# Altium footprint library Connector_SMD.PcbLib: 116 footprints (part 3 of 8)
Each footprint in its own frame and in the unit in brackets; x right, y up, seen from the top. Pads: shape width x height; smd on the part's side, far side on the other; paste and mask are expansions set on the pad; w line width, h text height; cw(c..) or ccw(c..) is an arc to the next point about the centre after c.
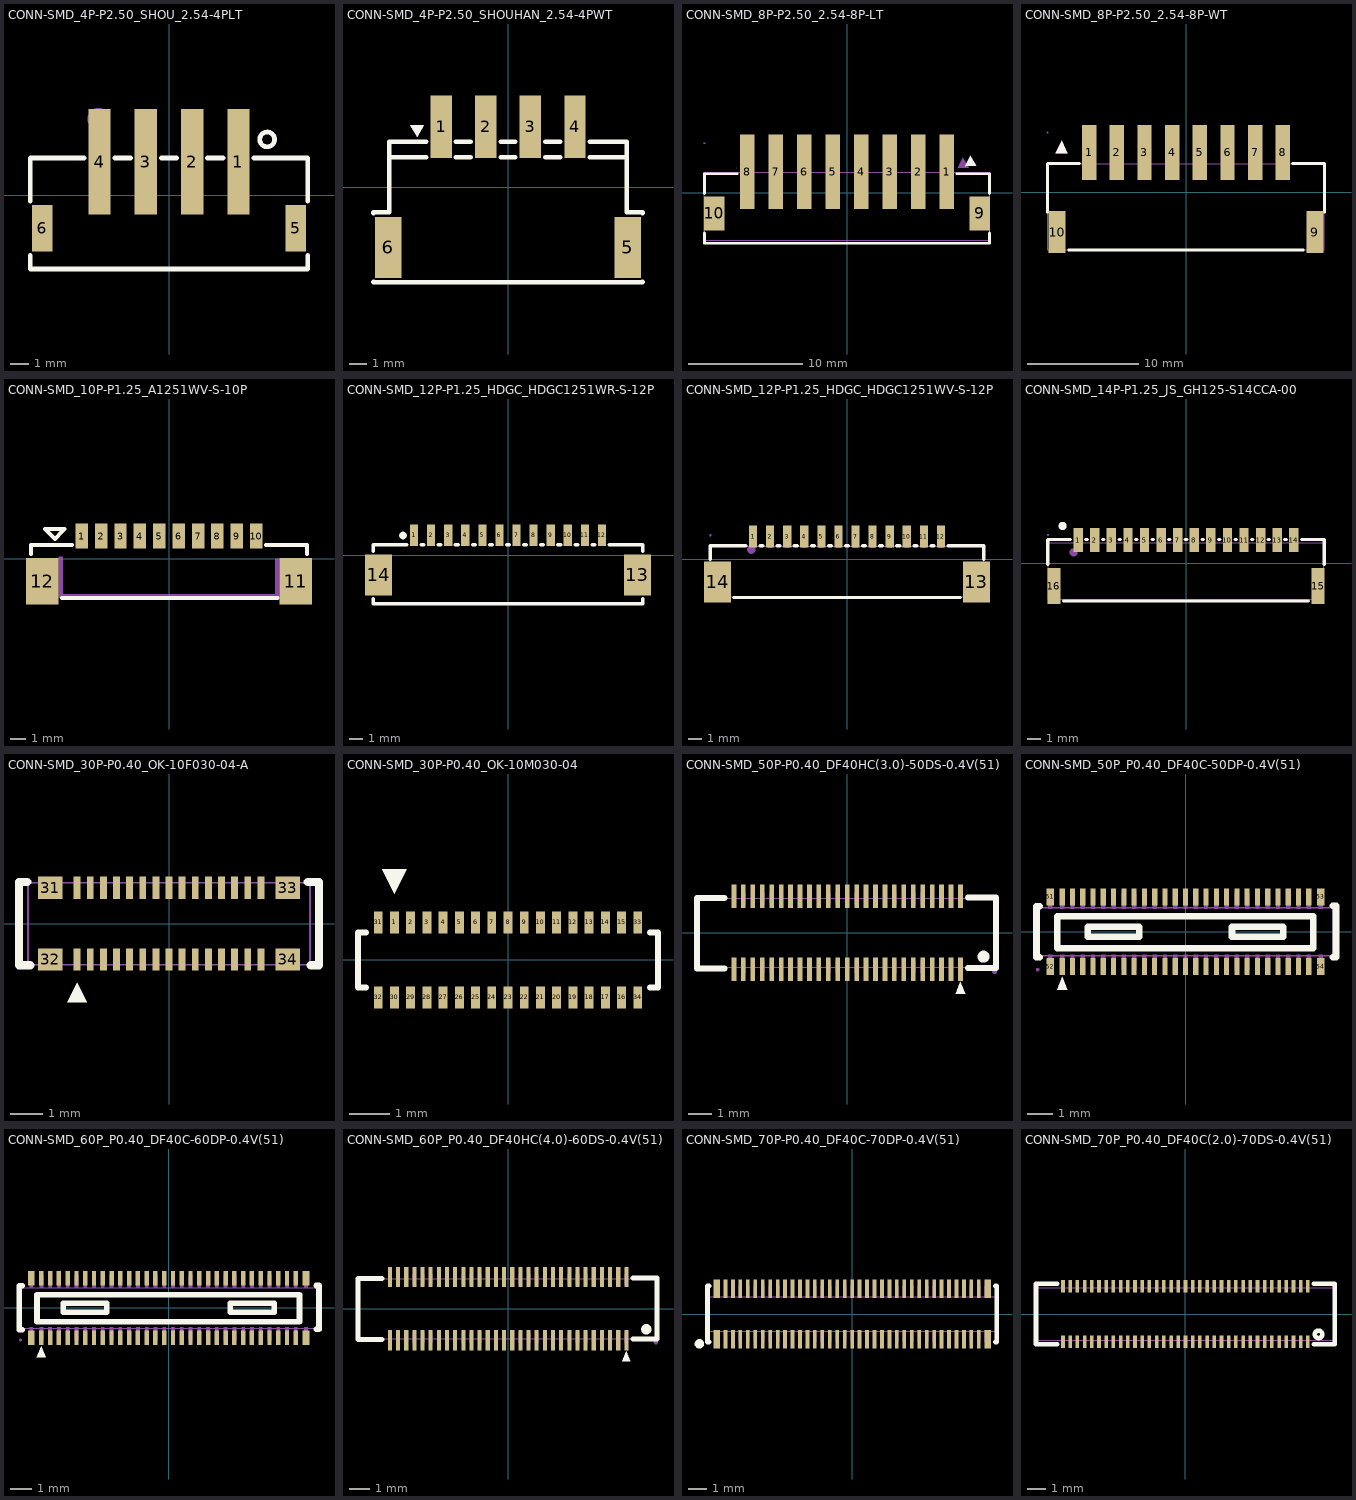
[diagram p2: the footprints below, top view; thin cyan lines are the x and y axes]

## CONN-SMD_4P-P2.50_SHOU_2.54-4PLT [mm]
pads (6):
  rect 1.2x5.7 smd: 1(3.75,1.8) 2(1.25,1.8) 3(-1.25,1.8) 4(-3.75,1.8)
  rect 1.1x2.5 smd: 5(6.85,-1.8) 6(-6.85,-1.8)
Top Overlay:
  circle w0.254: c5.3,3 r0.4
  lines w0.254: -7.5,-3.258 -7.5,-4 7.5,-4 7.5,-3.258 ; -7.5,-0.342 -7.5,2 -4.581,2 ; -2.919,2 -2.081,2 ; -0.419,2 0.419,2 ; 2.081,2 2.919,2 ; 4.581,2 7.5,2 7.5,-0.342
Mechanical 15:
  circle w0.6: c-3.8,4.1 r0.3
3D body "U1.stp": height 7.95, standoff 0, extent -7.5,-3.825 7.5,4.475

## CONN-SMD_4P-P2.50_SHOUHAN_2.54-4PWT [mm] "CONN-SMD_4P-P2.50_SHOUHAN_2.54-4PWT"
pads (6):
  rect 1.2x3.5 smd: 1(-3.75,3.375) 2(-1.25,3.375) 3(1.25,3.375) 4(3.75,3.375)
  rect 1.5x3.4 smd: 5(6.7,-3.375) 6(-6.7,-3.375)
Top Overlay:
  region: -5.092,2.828 -4.711,3.463 -5.473,3.463
  region: -5.092,2.828 -4.711,3.463 -5.473,3.463
  lines w0.254: -7.533,-5.291 -7.533,-5.334 7.533,-5.334 7.533,-5.29 ; -7.533,-1.459 -7.533,-1.397 -6.644,-1.397 -6.644,2.54 -4.581,2.54 ; -6.644,1.669 -4.581,1.669 ; -2.919,1.669 -2.081,1.669 ; -2.919,2.54 -2.081,2.54 ; -0.419,1.669 0.419,1.669 ; -0.419,2.54 0.419,2.54 ; 2.081,1.669 2.919,1.669 ; 2.081,2.54 2.919,2.54 ; 4.581,1.669 6.644,1.669 ; 4.581,2.54 6.644,2.54 6.644,-1.397 7.533,-1.397 7.533,-1.459
Mechanical 15:
  region: -5.092,2.828 -4.711,3.463 -5.473,3.463
3D body "COMM-SMD_4P-P2.50_SHOUHAN_2.54-4PWT.stp": height 6.1, standoff 0, extent -7.5,-5.262 7.5,4.938

## CONN-SMD_8P-P2.50_2.54-8P-LT [mm]
pads (10):
  rect 1.3x6.5 smd paste+0 mask+0.05: 1(8.75,1.825) 2(6.25,1.825) 3(3.75,1.825) 4(1.25,1.825) 5(-1.25,1.825) 6(-3.75,1.825) 7(-6.25,1.825) 8(-8.75,1.825)
  rect 1.8x3 smd paste+0 mask+0.05: 9(11.65,-1.825) 10(-11.65,-1.825)
Top Overlay:
  region: 10.347,2.286 10.371,2.333
  region: 10.371,2.333 11.33,2.333 10.822,3.222
  lines w0.254: -12.506,-3.556 -12.506,-4.445 12.506,-4.445 12.506,-3.556 ; -12.506,-0.094 -12.506,1.651 -9.631,1.651 ; 9.631,1.651 12.506,1.651 12.506,-0.094
Mechanical 6:
  region: 9.715,2.187 10.674,2.187 10.166,3.076
  region: -9.691,2.14 -9.715,2.187
Mechanical 15:
  region: -12.56,4.325 -12.559,4.301 -12.524,4.267 -12.476,4.267 -12.441,4.301 -12.44,4.325 -12.441,4.349 -12.476,4.383 -12.524,4.383 -12.559,4.349 -12.56,4.325
  region: -6.565,4.325 -5.935,4.325 -5.935,1.325 -6.565,1.325
  region: -9.065,4.325 -8.435,4.325 -8.435,1.325 -9.065,1.325
  region: -4.065,4.325 -3.435,4.325 -3.435,1.325 -4.065,1.325
  region: -1.565,4.325 -0.935,4.325 -0.935,1.325 -1.565,1.325
  region: 0.935,4.325 1.565,4.325 1.565,1.325 0.935,1.325
  region: 3.435,4.325 4.065,4.325 4.065,1.325 3.435,1.325
  region: 5.935,4.325 6.565,4.325 6.565,1.325 5.935,1.325
  region: 8.435,4.325 9.065,4.325 9.065,1.325 8.435,1.325
  region: -12.5,-0.825 -11.5,-0.825 -11.5,-2.825 -12.5,-2.825
  region: 11.5,-0.825 12.5,-0.825 12.5,-2.825 11.5,-2.825
  lines w0.051: -12.5,-4.156 -12.5,1.794 12.5,1.794 12.5,-4.156 -12.5,-4.156
3D body "PCBModelHDMI-SMD_HDMI-101S.step": height 7.92, standoff 0, extent -12.5,-4.561 12.5,4.339

## CONN-SMD_8P-P2.50_2.54-8P-WT [mm]
pads (10):
  rect 1.3x5 smd paste+0 mask+0.05: 1(-8.75,3.6) 2(-6.25,3.6) 3(-3.75,3.6) 4(-1.25,3.6) 5(1.25,3.6) 6(3.75,3.6) 7(6.25,3.6) 8(8.75,3.6)
  rect 1.5x3.8 smd paste+0 mask+0.05: 9(11.65,-3.6) 10(-11.65,-3.6)
Top Overlay:
  region: -11.236,4.676 -11.744,3.533 -10.728,3.533
  lines w0.254: -12.5,-1.792 -12.5,2.6 -9.631,2.6 ; -10.6,-5.2 10.6,-5.2 ; 9.631,2.6 12.5,2.6 12.5,-1.792
Mechanical 6:
  region: -11.236,4.676 -11.744,3.533 -10.728,3.533
Mechanical 15:
  region: -12.44,5.4 -12.44,5.425 -12.475,5.46 -12.525,5.46 -12.56,5.425 -12.56,5.4 -12.56,5.375 -12.525,5.34 -12.475,5.34 -12.44,5.375 -12.44,5.4
  region: -9.07,5.4 -8.43,5.4 -8.43,1.4 -9.07,1.4
  region: -6.57,5.4 -5.93,5.4 -5.93,1.4 -6.57,1.4
  region: -4.07,5.4 -3.43,5.4 -3.43,1.4 -4.07,1.4
  region: -1.57,5.4 -0.93,5.4 -0.93,1.4 -1.57,1.4
  region: 0.93,5.4 1.57,5.4 1.57,1.4 0.93,1.4
  region: 3.43,5.4 4.07,5.4 4.07,1.4 3.43,1.4
  region: 5.93,5.4 6.57,5.4 6.57,1.4 5.93,1.4
  region: 8.43,5.4 9.07,5.4 9.07,1.4 8.43,1.4
  region: 11.5,-2.2 11.8,-2.2 11.8,-5.2 11.5,-5.2
  region: -11.8,-2.2 -11.5,-2.2 -11.5,-5.2 -11.8,-5.2
  lines w0.051: -12.5,-5.2 -12.5,2.6 12.5,2.6 12.5,-5.2 -12.5,-5.2
3D body "PCBModelHDMI-SMD_HDMI-101S.step": height 6.1, standoff 0, extent -12.505,-5.303 12.505,5.297

## CONN-SMD_10P-P1.25_A1251WV-S-10P [mm]
pads (12):
  rect 0.8x1.6 smd: 1(-5.625,1.449) 2(-4.375,1.449) 3(-3.125,1.449) 4(-1.875,1.449) 5(-0.625,1.449) 6(0.625,1.449) 7(1.875,1.449) 8(3.125,1.449) 9(4.375,1.449) 10(5.625,1.449)
  rect 2.1x3 smd: 11(8.174,-1.45) 12(-8.174,-1.45)
Top Overlay:
  lines w0.254: -8.89,0.282 -8.89,0.889 -6.256,0.889 ; -7.62,1.905 -6.858,1.905 -6.731,1.905 ; -6.893,-2.54 6.985,-2.54 ; 6.256,0.889 8.89,0.889 8.89,0.282 ; -6.731,1.905 -8.001,1.905 -7.874,1.778 -7.366,1.27 -6.858,1.778 -6.731,1.905
Mechanical 15:
  region: -7.112,0.127 -6.858,0.127 -6.858,-2.286 6.858,-2.286 6.858,0 7.112,0 7.112,-2.54 -7.112,-2.54
3D body "CN1.stp": height 4.75, standoff 0, extent -8.675,-2.226 8.675,1.475

## CONN-SMD_12P-P1.25_HDGC_HDGC1251WR-S-12P [mm]
pads (14):
  rect 0.6x1.6 smd mask+0.05: 1(-6.875,1.45) 2(-5.625,1.45) 3(-4.375,1.45) 4(-3.125,1.45) 5(-1.875,1.45) 6(-0.625,1.45) 7(0.625,1.45) 8(1.875,1.45) 9(3.125,1.45) 10(4.375,1.45) 11(5.625,1.45) 12(6.875,1.45)
  rect 2x3 smd mask+0.05: 13(9.475,-1.45) 14(-9.475,-1.45)
Top Overlay:
  circle w0.254: c-7.68,1.43 r0.153
  lines w0.254: -9.85,-3.181 -9.85,-3.55 9.85,-3.55 ; -9.85,0.281 -9.85,0.75 -7.406,0.75 ; -6.344,0.75 -6.156,0.75 ; -5.094,0.75 -4.906,0.75 ; -3.844,0.75 -3.656,0.75 ; -2.594,0.75 -2.406,0.75 ; -1.344,0.75 -1.156,0.75 ; -0.094,0.75 0.094,0.75 ; 1.156,0.75 1.344,0.75 ; 2.406,0.75 2.594,0.75 ; 3.656,0.75 3.844,0.75 ; 4.906,0.75 5.094,0.75 ; 6.156,0.75 6.344,0.75 ; 7.406,0.75 9.85,0.75 9.85,0.281 ; 9.85,-3.56 9.85,-3.181
3D body "CN1.stp": height 3.42, standoff 0, extent -9.855,-3.563 9.855,1.837

## CONN-SMD_12P-P1.25_HDGC_HDGC1251WV-S-12P [mm]
pads (14):
  rect 0.6x1.6 smd mask+0.051: 1(-6.875,1.65) 2(-5.625,1.65) 3(-4.375,1.65) 4(-3.125,1.65) 5(-1.875,1.65) 6(-0.625,1.65) 7(0.625,1.65) 8(1.875,1.65) 9(3.125,1.65) 10(4.375,1.65) 11(5.625,1.65) 12(6.875,1.65)
  rect 2x3 smd mask+0.051: 13(9.475,-1.65) 14(-9.475,-1.65)
Top Overlay:
  lines w0.254: -10,0 -10,1 -7.406,1 ; -8.3,-2.8 8.3,-2.8 ; -6.344,1 -6.156,1 ; -5.094,1 -4.906,1 ; -3.844,1 -3.656,1 ; -2.594,1 -2.406,1 ; -1.344,1 -1.156,1 ; -0.094,1 0.094,1 ; 1.156,1 1.344,1 ; 2.406,1 2.594,1 ; 3.656,1 3.844,1 ; 4.906,1 5.094,1 ; 6.156,1 6.344,1 ; 7.406,1 10,1 10,0
Mechanical 6:
  circle w0.3: c-7,0.7 r0.15
Mechanical 15:
  region: -9.94,1.75 -9.94,1.775 -9.975,1.81 -10.025,1.81 -10.06,1.775 -10.06,1.75 -10.06,1.725 -10.025,1.69 -9.975,1.69 -9.94,1.725 -9.94,1.75
  region: 4.225,1.75 4.525,1.75 4.525,0.85 4.225,0.85
  region: 5.475,1.75 5.775,1.75 5.775,0.85 5.475,0.85
  region: 6.725,1.75 7.025,1.75 7.025,0.85 6.725,0.85
  region: 2.975,1.75 3.275,1.75 3.275,0.85 2.975,0.85
  region: 1.725,1.75 2.025,1.75 2.025,0.85 1.725,0.85
  region: 0.475,1.75 0.775,1.75 0.775,0.85 0.475,0.85
  region: -0.775,1.75 -0.475,1.75 -0.475,0.85 -0.775,0.85
  region: -4.525,1.75 -4.225,1.75 -4.225,0.85 -4.525,0.85
  region: -5.775,1.75 -5.475,1.75 -5.475,0.85 -5.775,0.85
  region: -7.025,1.75 -6.725,1.75 -6.725,0.85 -7.025,0.85
  region: -3.275,1.75 -2.975,1.75 -2.975,0.85 -3.275,0.85
  region: -2.025,1.75 -1.725,1.75 -1.725,0.85 -2.025,0.85
  region: -10,-1.05 -8.8,-1.05 -8.8,-2.75 -10,-2.75
  region: 8.8,-1.05 10,-1.05 10,-2.75 8.8,-2.75
  lines w0.051: -10,-2.75 -10,0.95 10,0.95 10,-2.75 -10,-2.75
3D body "CN1.stp": height 4.66, standoff 0, extent -10.005,-2.778 10.005,1.722

## CONN-SMD_14P-P1.25_JS_GH125-S14CCA-00 [mm]
pads (16):
  rect 0.7x1.8 smd paste+0 mask+0.05: 1(-8.125,1.733) 2(-6.875,1.733) 3(-5.625,1.733) 4(-4.375,1.733) 5(-3.125,1.733) 6(-1.875,1.733) 7(-0.625,1.733) 8(0.625,1.733) 9(1.875,1.733) 10(3.125,1.733) 11(4.375,1.733) 12(5.625,1.733) 13(6.875,1.733) 14(8.125,1.733)
  rect 1x2.7 smd paste+0 mask+0.05: 15(9.955,-1.733) 16(-9.955,-1.733)
Top Overlay:
  circle w0.3: c-9.3,2.8 r0.15
  lines w0.254: -10.424,-0.076 -10.424,1.778 -8.706,1.778 ; -9.224,-2.857 9.224,-2.857 ; -7.544,1.778 -7.456,1.778 ; -6.294,1.778 -6.206,1.778 ; -5.044,1.778 -4.956,1.778 ; -3.794,1.778 -3.706,1.778 ; -2.544,1.778 -2.456,1.778 ; -1.294,1.778 -1.206,1.778 ; -0.044,1.778 0.044,1.778 ; 1.206,1.778 1.294,1.778 ; 2.456,1.778 2.544,1.778 ; 3.706,1.778 3.794,1.778 ; 4.956,1.778 5.044,1.778 ; 6.206,1.778 6.294,1.778 ; 7.456,1.778 7.544,1.778 ; 8.706,1.778 10.424,1.778 10.424,-0.076
Mechanical 6:
  circle w0.3: c-8.473,0.816 r0.15
Mechanical 15:
  region: -10.34,2.133 -10.34,2.157 -10.375,2.193 -10.425,2.193 -10.46,2.157 -10.46,2.133 -10.46,2.108 -10.425,2.073 -10.375,2.073 -10.34,2.108 -10.34,2.133
  region: -10.055,-0.783 -9.855,-0.783 -9.855,-2.683 -10.055,-2.683
  region: 10.055,-2.683 9.855,-2.683 9.855,-0.783 10.055,-0.783
  region: -8.225,2.133 -8.025,2.133 -8.025,1.333 -8.225,1.333
  region: -6.975,2.133 -6.775,2.133 -6.775,1.333 -6.975,1.333
  region: -5.725,2.133 -5.525,2.133 -5.525,1.333 -5.725,1.333
  region: -4.475,2.133 -4.275,2.133 -4.275,1.333 -4.475,1.333
  region: -3.225,2.133 -3.025,2.133 -3.025,1.333 -3.225,1.333
  region: -1.975,2.133 -1.775,2.133 -1.775,1.333 -1.975,1.333
  region: -0.725,2.133 -0.525,2.133 -0.525,1.333 -0.725,1.333
  region: 0.525,2.133 0.725,2.133 0.725,1.333 0.525,1.333
  region: 1.775,2.133 1.975,2.133 1.975,1.333 1.775,1.333
  region: 3.025,2.133 3.225,2.133 3.225,1.333 3.025,1.333
  region: 4.275,2.133 4.475,2.133 4.475,1.333 4.275,1.333
  region: 5.525,2.133 5.725,2.133 5.725,1.333 5.525,1.333
  region: 6.775,2.133 6.975,2.133 6.975,1.333 6.775,1.333
  region: 8.025,2.133 8.225,2.133 8.225,1.333 8.025,1.333
  lines w0.051: -10.4,-2.725 -10.4,1.525 10.4,1.525 10.4,-2.725 -10.4,-2.725
3D body "CONN-SMD_14P-P1.25_JS_GH125-S14CCA-00.step": height 4.15, standoff 0, extent -10.4,-2.757 10.401,2.173

## CONN-SMD_30P-P0.40_OK-10F030-04-A [mm]
pads (34):
  rect 0.21x0.68 smd: 1(-2.8,-1.09) 2(-2.4,-1.09) 3(-2,-1.09) 4(-1.6,-1.09) 5(-1.2,-1.09) 6(-0.8,-1.09) 7(-0.4,-1.09) 8(0,-1.09) 9(0.4,-1.09) 10(0.8,-1.09) 11(1.2,-1.09) 12(1.6,-1.09) 13(2,-1.09) 14(2.4,-1.09) 15(2.8,-1.09) 16(2.8,1.09) 17(2.4,1.09) 18(2,1.09) 19(1.6,1.09) 20(1.2,1.09) 21(0.8,1.09) 22(0.4,1.09) 23(0,1.09) 24(-0.4,1.09) 25(-0.8,1.09) 26(-1.2,1.09) 27(-1.6,1.09) 28(-2,1.09) 29(-2.4,1.09) 30(-2.8,1.09)
  rect 0.75x0.68 smd: 31(-3.625,1.09) 32(-3.625,-1.09) 33(3.625,1.09) 34(3.625,-1.09)
Top Overlay:
  region: -3.1,-2.4 -2.8,-1.8 -2.5,-2.4
  lines w0.254: -4.318,1.27 -4.572,1.27 -4.572,-1.27 -4.231,-1.27 ; 4.231,1.27 4.572,1.27 4.572,-1.27 4.318,-1.27
Mechanical 15:
  drawing of 39 lines, arcs and shapes, not listed
3D body "CONN-SMD_30P-P0.40_OK-10F030-04-A.stp": height 0.72, standoff 0, extent -4.3,-1.25 4.3,1.25

## CONN-SMD_30P-P0.40_OK-10M030-04 [mm]
pads (34):
  rect 0.22x0.55 smd: 1(-2.8,0.925) 2(-2.4,0.925) 3(-2,0.925) 4(-1.6,0.925) 5(-1.2,0.925) 6(-0.8,0.925) 7(-0.4,0.925) 8(0,0.925) 9(0.4,0.925) 10(0.8,0.925) 11(1.2,0.925) 12(1.6,0.925) 13(2,0.925) 14(2.4,0.925) 15(2.8,0.925) 16(2.8,-0.925) 17(2.4,-0.925) 18(2,-0.925) 19(1.6,-0.925) 20(1.2,-0.925) 21(0.8,-0.925) 22(0.4,-0.925) 23(0,-0.925) 24(-0.4,-0.925) 25(-0.8,-0.925) 26(-1.2,-0.925) 27(-1.6,-0.925) 28(-2,-0.925) 29(-2.4,-0.925) 30(-2.8,-0.925) 31(-3.2,0.925) 32(-3.2,-0.925) 33(3.2,0.925) 34(3.2,-0.925)
Top Overlay:
  region: -2.5,2.235 -2.8,1.635 -3.1,2.235
  lines w0.152: -3.5,-0.68 -3.7,-0.68 -3.7,0.68 -3.5,0.68 ; 3.5,-0.68 3.7,-0.68 3.7,0.68 3.5,0.68

## CONN-SMD_50P-P0.40_DF40HC(3.0)-50DS-0.4V(51) [mm]
pads (50):
  rect 0.2x1 smd mask+0.051: 1(4.8,-1.55) 2(4.4,-1.55) 3(4,-1.55) 4(3.6,-1.55) 5(3.2,-1.55) 6(2.8,-1.55) 7(2.4,-1.55) 8(2,-1.55) 9(1.6,-1.55) 10(1.2,-1.55) 11(0.8,-1.55) 12(0.4,-1.55) 13(0,-1.55) 14(-0.4,-1.55) 15(-0.8,-1.55) 16(-1.2,-1.55) 17(-1.6,-1.55) 18(-2,-1.55) 19(-2.4,-1.55) 20(-2.8,-1.55) 21(-3.2,-1.55) 22(-3.6,-1.55) 23(-4,-1.55) 24(-4.4,-1.55) 25(-4.8,-1.55) 26(-4.8,1.55) 27(-4.4,1.55) 28(-4,1.55) 29(-3.6,1.55) 30(-3.2,1.55) 31(-2.8,1.55) 32(-2.4,1.55) 33(-2,1.55) 34(-1.6,1.55) 35(-1.2,1.55) 36(-0.8,1.55) 37(-0.4,1.55) 38(0,1.55) 39(0.4,1.55) 40(0.8,1.55) 41(1.2,1.55) 42(1.6,1.55) 43(2,1.55) 44(2.4,1.55) 45(2.8,1.55) 46(3.2,1.55) 47(3.6,1.55) 48(4,1.55) 49(4.4,1.55) 50(4.8,1.55)
Top Overlay:
  circle w0.254: c5.779,-1.016 r0.127
  region: 4.595,-2.585 4.995,-2.585 4.795,-2.085
  lines w0.254: -5.197,-1.524 -6.366,-1.524 -6.366,1.476 -5.197,1.476 ; 5.131,-1.5 6.3,-1.5 6.3,1.5 5.131,1.5
Mechanical 15:
  drawing of 55 lines, arcs and shapes, not listed
3D body "DF40HC(3.0)-50DS.stp": height 2.9, standoff 0, extent -6.3,-1.69 6.3,1.69

## CONN-SMD_50P_P0.40_DF40C-50DP-0.4V(51) [mm]
pads (54):
  rect 0.2x0.66 smd mask+0.051: 1(-4.8,-1.355) 2(-4.4,-1.355) 3(-4,-1.355) 4(-3.6,-1.355) 5(-3.2,-1.355) 6(-2.8,-1.355) 7(-2.4,-1.355) 8(-2,-1.355) 9(-1.6,-1.355) 10(-1.2,-1.355) 11(-0.8,-1.355) 12(-0.4,-1.355) 13(0,-1.355) 14(0.4,-1.355) 15(0.8,-1.355) 16(1.2,-1.355) 17(1.6,-1.355) 18(2,-1.355) 19(2.4,-1.355) 20(2.8,-1.355) 21(3.2,-1.355) 22(3.6,-1.355) 23(4,-1.355) 24(4.4,-1.355) 25(4.8,-1.355) 26(4.8,1.355) 27(4.4,1.355) 28(4,1.355) 29(3.6,1.355) 30(3.2,1.355) 31(2.8,1.355) 32(2.4,1.355) 33(2,1.355) 34(1.6,1.355) 35(1.2,1.355) 36(0.8,1.355) 37(0.4,1.355) 38(0,1.355) 39(-0.4,1.355) 40(-0.8,1.355) 41(-1.2,1.355) 42(-1.6,1.355) 43(-2,1.355) 44(-2.4,1.355) 45(-2.8,1.355) 46(-3.2,1.355) 47(-3.6,1.355) 48(-4,1.355) 49(-4.4,1.355) 50(-4.8,1.355)
  rect 0.3x0.66 smd mask+0.051: 51(-5.265,1.355) 52(-5.265,-1.355) 53(5.265,1.355) 54(5.265,-1.355)
Top Overlay:
  region: -5,-2.25 -4.6,-2.25 -4.8,-1.75
  lines w0.254: -5.67,-1 -5.8,-1 -5.8,1 -5.67,1 ; 5.728,-0.984 5.858,-0.984 5.858,1.016 5.728,1.016 ; -5,-0.635 4.969,-0.635 4.969,0.6 -5,0.6 -5,-0.635 ; -3.81,-0.2 -3.81,0.2 -1.81,0.2 -1.81,-0.2 -3.81,-0.2 ; 1.81,-0.2 3.81,-0.2 3.81,0.2 1.81,0.2 1.81,-0.2
Mechanical 15:
  drawing of 60 lines, arcs and shapes, not listed
3D body "DF40C-50DP.stp": height 1.14, standoff 0, extent -5.76,-1.495 5.76,1.475

## CONN-SMD_60P_P0.40_DF40C-60DP-0.4V(51) [mm]
pads (64):
  rect 0.2x0.66 smd mask+0.051: 1(-5.8,-1.355) 2(-5.4,-1.355) 3(-5,-1.355) 4(-4.6,-1.355) 5(-4.2,-1.355) 6(-3.8,-1.355) 7(-3.4,-1.355) 8(-3,-1.355) 9(-2.6,-1.355) 10(-2.2,-1.355) 11(-1.8,-1.355) 12(-1.4,-1.355) 13(-1,-1.355) 14(-0.6,-1.355) 15(-0.2,-1.355) 16(0.2,-1.355) 17(0.6,-1.355) 18(1,-1.355) 19(1.4,-1.355) 20(1.8,-1.355) 21(2.2,-1.355) 22(2.6,-1.355) 23(3,-1.355) 24(3.4,-1.355) 25(3.8,-1.355) 26(4.2,-1.355) 27(4.6,-1.355) 28(5,-1.355) 29(5.4,-1.355) 30(5.8,-1.355) 31(5.8,1.355) 32(5.4,1.355) 33(5,1.355) 34(4.6,1.355) 35(4.2,1.355) 36(3.8,1.355) 37(3.4,1.355) 38(3,1.355) 39(2.6,1.355) 40(2.2,1.355) 41(1.8,1.355) 42(1.4,1.355) 43(1,1.355) 44(0.6,1.355) 45(0.2,1.355) 46(-0.2,1.355) 47(-0.6,1.355) 48(-1,1.355) 49(-1.4,1.355) 50(-1.8,1.355) 51(-2.2,1.355) 52(-2.6,1.355) 53(-3,1.355) 54(-3.4,1.355) 55(-3.8,1.355) 56(-4.2,1.355) 57(-4.6,1.355) 58(-5,1.355) 59(-5.4,1.355) 60(-5.8,1.355)
  rect 0.3x0.66 smd mask+0.051: 61(-6.265,1.355) 62(-6.265,-1.355) 63(6.265,1.355) 64(6.265,-1.355)
Top Overlay:
  region: -6,-2.25 -5.6,-2.25 -5.8,-1.75
  lines w0.254: -6.67,-1 -6.8,-1 -6.8,1 -6.67,1 ; 6.728,-0.984 6.858,-0.984 6.858,1.016 6.728,1.016 ; -6,-0.635 -6,0.6 5.969,0.6 5.969,-0.635 -6,-0.635 ; -4.81,-0.2 -4.81,0.2 -2.81,0.2 -2.81,-0.2 -4.81,-0.2 ; 2.81,-0.2 2.81,0.2 4.81,0.2 4.81,-0.2 2.81,-0.2
Mechanical 15:
  drawing of 70 lines, arcs and shapes, not listed
3D body "DF40C-60DP-0.4V.step": height 1.16, standoff 0, extent -6.76,-1.485 6.76,1.485

## CONN-SMD_60P_P0.40_DF40HC(4.0)-60DS-0.4V(51) [mm]
pads (60):
  rect 0.2x1 smd mask+0.051: 1(5.8,-1.55) 2(5.4,-1.55) 3(5,-1.55) 4(4.6,-1.55) 5(4.2,-1.55) 6(3.8,-1.55) 7(3.4,-1.55) 8(3,-1.55) 9(2.6,-1.55) 10(2.2,-1.55) 11(1.8,-1.55) 12(1.4,-1.55) 13(1,-1.55) 14(0.6,-1.55) 15(0.2,-1.55) 16(-0.2,-1.55) 17(-0.6,-1.55) 18(-1,-1.55) 19(-1.4,-1.55) 20(-1.8,-1.55) 21(-2.2,-1.55) 22(-2.6,-1.55) 23(-3,-1.55) 24(-3.4,-1.55) 25(-3.8,-1.55) 26(-4.2,-1.55) 27(-4.6,-1.55) 28(-5,-1.55) 29(-5.4,-1.55) 30(-5.8,-1.55) 31(-5.8,1.55) 32(-5.4,1.55) 33(-5,1.55) 34(-4.6,1.55) 35(-4.2,1.55) 36(-3.8,1.55) 37(-3.4,1.55) 38(-3,1.55) 39(-2.6,1.55) 40(-2.2,1.55) 41(-1.8,1.55) 42(-1.4,1.55) 43(-1,1.55) 44(-0.6,1.55) 45(-0.2,1.55) 46(0.2,1.55) 47(0.6,1.55) 48(1,1.55) 49(1.4,1.55) 50(1.8,1.55) 51(2.2,1.55) 52(2.6,1.55) 53(3,1.55) 54(3.4,1.55) 55(3.8,1.55) 56(4.2,1.55) 57(4.6,1.55) 58(5,1.55) 59(5.4,1.55) 60(5.8,1.55)
Top Overlay:
  circle w0.254: c6.779,-1.016 r0.127
  region: 5.595,-2.585 5.995,-2.585 5.795,-2.085
  lines w0.254: -6.197,-1.524 -7.366,-1.524 -7.366,1.476 -6.197,1.476 ; 6.131,-1.5 7.3,-1.5 7.3,1.5 6.131,1.5
Mechanical 15:
  drawing of 65 lines, arcs and shapes, not listed
3D body "DF40HC-4.0-60DS-0.4V-51.step": height 2.9, standoff 0, extent -7.333,-1.69 7.267,1.69

## CONN-SMD_70P-P0.40_DF40C-70DP-0.4V(51) [mm]
pads (74):
  rect 0.2x1 smd: 1(-6.8,-1.355) 2(-6.4,-1.355) 3(-6,-1.355) 4(-5.6,-1.355) 5(-5.2,-1.355) 6(-4.8,-1.355) 7(-4.4,-1.355) 8(-4,-1.355) 9(-3.6,-1.355) 10(-3.2,-1.355) 11(-2.8,-1.355) 12(-2.4,-1.355) 13(-2,-1.355) 14(-1.6,-1.355) 15(-1.2,-1.355) 16(-0.8,-1.355) 17(-0.4,-1.355) 18(0,-1.355) 19(0.4,-1.355) 20(0.8,-1.355) 21(1.2,-1.355) 22(1.6,-1.355) 23(2,-1.355) 24(2.4,-1.355) 25(2.8,-1.355) 26(3.2,-1.355) 27(3.6,-1.355) 28(4,-1.355) 29(4.4,-1.355) 30(4.8,-1.355) 31(5.2,-1.355) 32(5.6,-1.355) 33(6,-1.355) 34(6.4,-1.355) 35(6.8,-1.355) 36(6.8,1.355) 37(6.4,1.355) 38(6,1.355) 39(5.6,1.355) 40(5.2,1.355) 41(4.8,1.355) 42(4.4,1.355) 43(4,1.355) 44(3.6,1.355) 45(3.2,1.355) 46(2.8,1.355) 47(2.4,1.355) 48(2,1.355) 49(1.6,1.355) 50(1.2,1.355) 51(0.8,1.355) 52(0.4,1.355) 53(0,1.355) 54(-0.4,1.355) 55(-0.8,1.355) 56(-1.2,1.355) 57(-1.6,1.355) 58(-2,1.355) 59(-2.4,1.355) 60(-2.8,1.355) 61(-3.2,1.355) 62(-3.6,1.355) 63(-4,1.355) 64(-4.4,1.355) 65(-4.8,1.355) 66(-5.2,1.355) 67(-5.6,1.355) 68(-6,1.355) 69(-6.4,1.355) 70(-6.8,1.355)
  rect 0.35x1 smd: 71(-7.275,1.355) 72(-7.275,-1.355) 73(7.275,-1.355) 74(7.275,1.355)
Top Overlay:
  circle w0.254: c-8.2,-1.6 r0.127
  lines w0.254: -7.681,-1.5 -7.76,-1.5 -7.76,1.5 -7.681,1.5 ; 7.681,-1.5 7.76,-1.5 7.76,1.5 7.681,1.5
Mechanical 15:
  drawing of 79 lines, arcs and shapes, not listed
3D body "1.stp": height 1.2, standoff 0, extent -7.76,-1.485 7.76,1.485

## CONN-SMD_70P_P0.40_DF40C(2.0)-70DS-0.4V(51) [mm]
pads (70):
  rect 0.2x0.7 smd: 1(6.8,-1.54) 2(6.4,-1.54) 3(6,-1.54) 4(5.6,-1.54) 5(5.2,-1.54) 6(4.8,-1.54) 7(4.4,-1.54) 8(4,-1.54) 9(3.6,-1.54) 10(3.2,-1.54) 11(2.8,-1.54) 12(2.4,-1.54) 13(2,-1.54) 14(1.6,-1.54) 15(1.2,-1.54) 16(0.8,-1.54) 17(0.4,-1.54) 18(0,-1.54) 19(-0.4,-1.54) 20(-0.8,-1.54) 21(-1.2,-1.54) 22(-1.6,-1.54) 23(-2,-1.54) 24(-2.4,-1.54) 25(-2.8,-1.54) 26(-3.2,-1.54) 27(-3.6,-1.54) 28(-4,-1.54) 29(-4.4,-1.54) 30(-4.8,-1.54) 31(-5.2,-1.54) 32(-5.6,-1.54) 33(-6,-1.54) 34(-6.4,-1.54) 35(-6.8,-1.54) 36(-6.8,1.54) 37(-6.4,1.54) 38(-6,1.54) 39(-5.6,1.54) 40(-5.2,1.54) 41(-4.8,1.54) 42(-4.4,1.54) 43(-4,1.54) 44(-3.6,1.54) 45(-3.2,1.54) 46(-2.8,1.54) 47(-2.4,1.54) 48(-2,1.54) 49(-1.6,1.54) 50(-1.2,1.54) 51(-0.8,1.54) 52(-0.4,1.54) 53(0,1.54) 54(0.4,1.54) 55(0.8,1.54) 56(1.2,1.54) 57(1.6,1.54) 58(2,1.54) 59(2.4,1.54) 60(2.8,1.54) 61(3.2,1.54) 62(3.6,1.54) 63(4,1.54) 64(4.4,1.54) 65(4.8,1.54) 66(5.2,1.54) 67(5.6,1.54) 68(6,1.54) 69(6.4,1.54) 70(6.8,1.54)
Top Overlay:
  circle w0.254: c7.391,-1.13 r0.207
  lines w0.254: -7.131,-1.69 -8.3,-1.69 -8.3,1.69 -7.131,1.69 ; 7.131,-1.69 8.3,-1.69 8.3,1.69 7.131,1.69
Mechanical 15:
  drawing of 75 lines, arcs and shapes, not listed
3D body "CN1.stp": height 1.95, standoff 0, extent -8.3,-1.69 8.3,1.69